# EAGLE library part LAN7800 (library Demo_Board)
Microchip LAN7800 SuperSpeed USB 3.1 Gen1 to 10/100/1000 Ethernet Controller, QFN-48
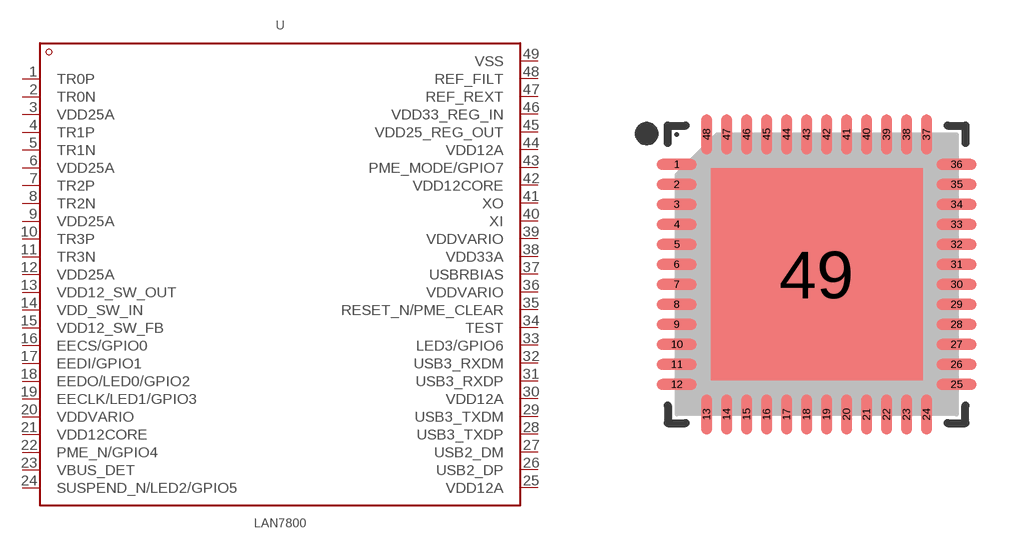
[diagram p0: symbol with the pads of QFN-48_7x7mm; footprint QFN-48_7x7mm]

Designator prefix U

## LAN7800  [QFN-48_7x7mm]
1  TR0P
2  TR0N
3  VDD25A
4  TR1P
5  TR1N
6  VDD25A
7  TR2P
8  TR2N
9  VDD25A
10  TR3P
11  TR3N
12  VDD25A
13  VDD12_SW_OUT
14  VDD_SW_IN
15  VDD12_SW_FB
16  EECS/GPIO0
17  EEDI/GPIO1
18  EEDO/LED0/GPIO2
19  EECLK/LED1/GPIO3
20  VDDVARIO
21  VDD12CORE
22  PME_N/GPIO4
23  VBUS_DET
24  SUSPEND_N/LED2/GPIO5
25  VDD12A
26  USB2_DP
27  USB2_DM
28  USB3_TXDP
29  USB3_TXDM
30  VDD12A
31  USB3_RXDP
32  USB3_RXDM
33  LED3/GPIO6
34  TEST
35  RESET_N/PME_CLEAR
36  VDDVARIO
37  USBRBIAS
38  VDD33A
39  VDDVARIO
40  XI
41  XO
42  VDD12CORE
43  PME_MODE/GPIO7
44  VDD12A
45  VDD25_REG_OUT
46  VDD33_REG_IN
47  REF_REXT
48  REF_FILT
49  VSS

## Footprint QFN-48_7x7mm (pad centres in mm)
QFN-48, 7 x 7 mm
smd 1 x 0.28: 1 -3.5,2.75; 2 -3.5,2.25; 3 -3.5,1.75; 4 -3.5,1.25; 5 -3.5,0.75; 6 -3.5,0.25; 7 -3.5,-0.25; 8 -3.5,-0.75; 9 -3.5,-1.25; 10 -3.5,-1.75; 11 -3.5,-2.25; 12 -3.5,-2.75; 25 3.5,-2.75; 26 3.5,-2.25; 27 3.5,-1.75; 28 3.5,-1.25; 29 3.5,-0.75; 30 3.5,-0.25; 31 3.5,0.25; 32 3.5,0.75; 33 3.5,1.25; 34 3.5,1.75; 35 3.5,2.25; 36 3.5,2.75
smd 0.28 x 1: 13 -2.75,-3.5; 14 -2.25,-3.5; 15 -1.75,-3.5; 16 -1.25,-3.5; 17 -0.75,-3.5; 18 -0.25,-3.5; 19 0.25,-3.5; 20 0.75,-3.5; 21 1.25,-3.5; 22 1.75,-3.5; 23 2.25,-3.5; 24 2.75,-3.5; 37 2.75,3.5; 38 2.25,3.5; 39 1.75,3.5; 40 1.25,3.5; 41 0.75,3.5; 42 0.25,3.5; 43 -0.25,3.5; 44 -0.75,3.5; 45 -1.25,3.5; 46 -1.75,3.5; 47 -2.25,3.5; 48 -2.75,3.5
smd 5.3 x 5.3: 49 0,0